# Altium integrated library optopara_maze.IntLib: 6 symbols
Pins are listed as number, name and electrical type; pins without a type are passive.

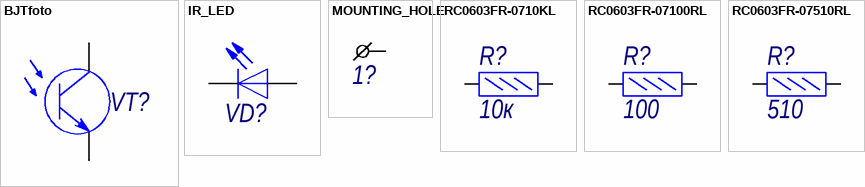
[diagram p0: symbols BJTfoto to RC0603FR-07510RL]

## BJTfoto
designator VT?, comment -  (value not drawn)
Биполярный NPN транзистор; TU: -; Manufacturer: -; Name: -
footprint BJTfoto
pins: 1, 2

## IR_LED
designator VD?
ИК светодиод
footprint BJTfoto
pins: 1 A, 2 K

## MOUNTING_HOLE
designator 1?  (value not drawn)  (no BOM)
footprint TP_1X1
footprint TP_0,6X1
pins: 1

## RC0603FR-0710KL
designator R?, comment 10к
Резистор 10кОм 0,063Вт 1%; Manufacturer: YAGEO; Name: RC0603FR-0710KL; Tolerance: 1%; Value: 10к
footprint R0603
pins: 1, 2

## RC0603FR-07100RL
designator R?, comment 100
Резистор 100 Ом 0,1Вт 1%; Manufacturer: YAGEO; Name: RC0603FR-07100RL; Tolerance: 1%; Value: 100
footprint R0603
pins: 1, 2

## RC0603FR-07510RL
designator R?, comment 510
Резистор 510 Ом 0,1Вт 1%; Manufacturer: YAGEO; Name: RC0603FR-07510RL; Tolerance: 1%; Value: 510
footprint R0603
pins: 1, 2